# Altium footprint library WR-PHD_Socket Header_2.54mm.PcbLib: 187 footprints (part 5 of 12)
Each footprint in its own frame and in the unit in brackets; x right, y up, seen from the top. Pads: shape width x height; smd on the part's side, far side on the other; paste and mask are expansions set on the pad; w line width, h text height; cw(c..) or ccw(c..) is an arc to the next point about the centre after c.
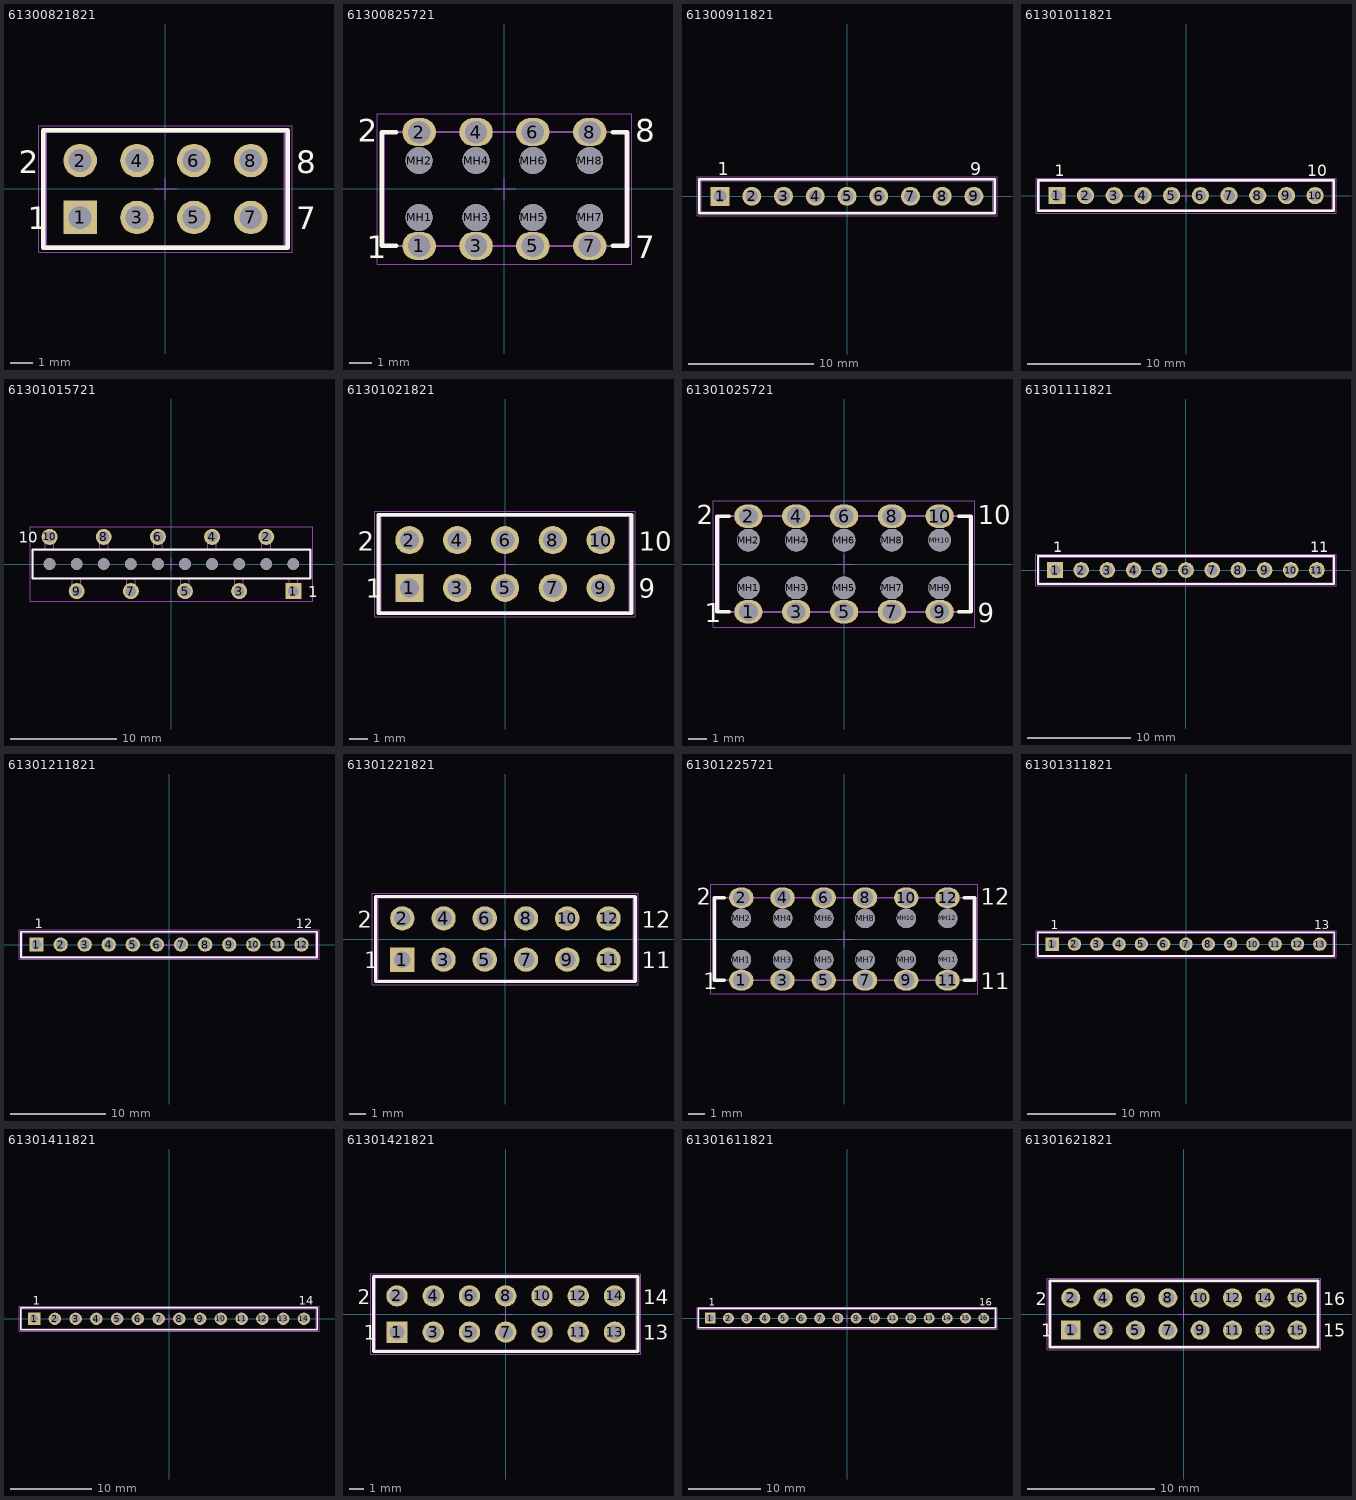
[diagram p4: the footprints below, top view; thin cyan lines are the x and y axes]

## 61300821821 [mm] "Socket Header, Pitch 2.54 mm, THT, Vertical, dual row, 8p"
height 8.4
pads (8):
  rect 1.5x1.5 hole 1.02: 1(-3.81,-1.27)
  round 1.5 hole 1.02: 2(-3.81,1.27) 3(-1.27,-1.27) 4(-1.27,1.27) 5(1.27,-1.27) 6(1.27,1.27) 7(3.81,-1.27) 8(3.81,1.27)
Top Overlay:
  lines w0.2: -5.455,-2.615 -5.455,2.615 5.455,2.615 5.455,-2.615 -5.455,-2.615
  text "2" at -6.54,0.7 h1.02
  text "1" at -6.14,-1.8 h1.02
  text "8" at 5.84,0.7 h1.02
  text "7" at 5.84,-1.8 h1.02
Mechanical 13:
  lines w0.1: -5.33,-2.54 5.33,-2.54 5.33,2.54 -5.33,2.54 -5.33,-2.54
Mechanical 15:
  lines w0.05: -0.5,0 0.5,0 ; 0,-0.5 0,0.5 ; -5.655,-2.815 5.655,-2.815 5.655,2.815 -5.655,2.815 -5.655,-2.815
3D body "61300821821.stp": height 8.45, standoff -3.05, extent -5.33,-2.54 5.33,2.54

## 61300825721 [mm] "Dual Socket Header Bottom Entry, pitch 2.54mm, 8p"
height 5
pads (16):
  oval 1.5x1.25 hole 1: 1(-3.81,-2.54) 2(-3.81,2.54) 3(-1.27,-2.54) 4(-1.27,2.54) 5(1.27,-2.54) 6(1.27,2.54) 7(3.81,-2.54) 8(3.81,2.54)
  round 1.2 hole 1.2 unplated: MH1(-3.81,-1.27) MH2(-3.81,1.27) MH3(-1.27,-1.27) MH4(-1.27,1.27) MH5(1.27,-1.27) MH6(1.27,1.27) MH7(3.81,-1.27) MH8(3.81,1.27)
Top Overlay:
  lines w0.2: -4.84,-2.54 -5.48,-2.54 -5.48,2.54 -4.84,2.54 ; 4.84,-2.54 5.48,-2.54 5.48,2.54 4.84,2.54
  text "8" at 5.84,2.1 h1.02
  text "7" at 5.84,-3.1 h1.02
  text "1" at -6.14,-3.1 h1.02
  text "2" at -6.54,2.1 h1.02
Mechanical 13:
  lines w0.1: -5.38,-2.54 -5.38,2.54 5.38,2.54 5.38,-2.54 -5.38,-2.54
Mechanical 15:
  lines w0.05: -0.5,0 0.5,0 ; 0,-0.5 0,0.5 ; -5.68,-3.365 5.68,-3.365 5.68,3.365 -5.68,3.365 -5.68,-3.365
3D body "61300825721.stp": height 5.05, standoff -3.05, extent -5.38,-2.665 5.38,2.665

## 61300911821 [mm] "Socket Header, Pitch 2.54 mm, THT, Vertical, single row, 9p"
height 8.5
pads (9):
  rect 1.52x1.52 hole 1.02: 1(-10.16,0)
  round 1.52 hole 1.02: 2(-7.62,0) 3(-5.08,0) 4(-2.54,0) 5(0,0) 6(2.54,0) 7(5.08,0) 8(7.62,0) 9(10.16,0)
Top Overlay:
  lines w0.2: -11.805,-1.35 11.805,-1.35 11.805,1.35 -11.805,1.35 -11.805,-1.35
  text "9" at 9.85,1.7 h1.02
  text "1" at -10.35,1.7 h1.02
Mechanical 13:
  lines w0.1: -11.68,-1.25 11.68,-1.25 11.68,1.25 -11.68,1.25 -11.68,-1.25
Mechanical 15:
  lines w0.05: -0.5,0 0.5,0 ; 0,-0.5 0,0.5 ; -12.005,-1.55 12.005,-1.55 12.005,1.55 -12.005,1.55 -12.005,-1.55
3D body "61300911821.stp": height 8.55, standoff -3.06, extent -11.68,-1.25 11.68,1.25

## 61301011821 [mm] "Socket Header, Pitch 2.54 mm, THT, Vertical, single row, 10p"
height 8.5
pads (10):
  rect 1.52x1.52 hole 1.02: 1(-11.43,0)
  round 1.52 hole 1.02: 2(-8.89,0) 3(-6.35,0) 4(-3.81,0) 5(-1.27,0) 6(1.27,0) 7(3.81,0) 8(6.35,0) 9(8.89,0) 10(11.43,0)
Top Overlay:
  lines w0.2: -13.075,-1.35 13.075,-1.35 13.075,1.35 -13.075,1.35 -13.075,-1.35
  text "10" at 10.75,1.7 h1.02
  text "1" at -11.62,1.7 h1.02
Mechanical 13:
  lines w0.1: -12.95,-1.25 12.95,-1.25 12.95,1.25 -12.95,1.25 -12.95,-1.25
Mechanical 15:
  lines w0.05: -0.5,0 0.5,0 ; 0,-0.5 0,0.5 ; -13.275,-1.55 13.275,-1.55 13.275,1.55 -13.275,1.55 -13.275,-1.55
3D body "61301011821.stp": height 8.55, standoff -3.06, extent -12.95,-1.25 12.95,1.25

## 61301015721 [mm] "Socket Header, Pitch 2.54 mm, THT, Vertical, single row, 10p"
height 5
pads (20):
  rect 1.5x1.5 hole 1: 1(11.43,-2.54)
  round 1.5 hole 1: 2(8.89,2.54) 3(6.35,-2.54) 4(3.81,2.54) 5(1.27,-2.54) 6(-1.27,2.54) 7(-3.81,-2.54) 8(-6.35,2.54) 9(-8.89,-2.54) 10(-11.43,2.54)
  round 1.1 hole 1.1 unplated: MH1(11.43,0) MH2(8.89,0) MH3(6.35,0) MH4(3.81,0) MH5(1.27,0) MH6(-1.27,0) MH7(-3.81,0) MH8(-6.35,0) MH9(-8.89,0) MH10(-11.43,0)
Top Overlay:
  lines w0.2: -13.05,-1.345 13.05,-1.345 13.05,1.345 -13.05,1.345 -13.05,-1.345
  text "1" at 12.82,-3.1 h1.02
  text "10" at -14.3,2 h1.02
Mechanical 13:
  lines w0.1: -11.83,1.27 -11.83,2.665 -11.03,2.665 -11.03,1.27 ; -9.29,-1.27 -9.29,-2.665 -8.49,-2.665 -8.49,-1.27 ; -6.75,1.27 -6.75,2.665 -5.95,2.665 -5.95,1.27 ; -4.21,-1.27 -4.21,-2.665 -3.41,-2.665 -3.41,-1.27 ; -1.67,1.27 -1.67,2.665 -0.87,2.665 -0.87,1.27 ; 0.87,-1.27 0.87,-2.665 1.67,-2.665 1.67,-1.27 ; 3.41,1.27 3.41,2.665 4.21,2.665 4.21,1.27 ; 5.95,-1.27 5.95,-2.665 6.75,-2.665 6.75,-1.27 ; 8.49,1.27 8.49,2.665 9.29,2.665 9.29,1.27 ; 11.03,-1.27 11.03,-2.665 11.83,-2.665 11.83,-1.27 ; -12.95,-1.27 12.95,-1.27 12.95,1.27 -12.95,1.27 -12.95,-1.27
Mechanical 15:
  lines w0.05: -0.5,0 0.5,0 ; 0,-0.5 0,0.5 ; -13.25,-3.49 -13.25,3.49 13.25,3.49 13.25,-3.49 -13.25,-3.49
3D body "61301015721.stp": height 5.17, standoff -2.93, extent -13,-2.665 13,2.665

## 61301021821 [mm] "Socket Header, Pitch 2.54 mm, THT, Vertical, dual row, 10p"
height 8.4
pads (10):
  rect 1.5x1.5 hole 1.02: 1(-5.08,-1.27)
  round 1.5 hole 1.02: 2(-5.08,1.27) 3(-2.54,-1.27) 4(-2.54,1.27) 5(0,-1.27) 6(0,1.27) 7(2.54,-1.27) 8(2.54,1.27) 9(5.08,-1.27) 10(5.08,1.27)
Top Overlay:
  lines w0.2: -6.725,-2.615 6.725,-2.615 6.725,2.615 -6.725,2.615 -6.725,-2.615
  text "1" at -7.41,-1.8 h1.02
  text "2" at -7.81,0.7 h1.02
  text "10" at 7.11,0.7 h1.02
  text "9" at 7.11,-1.8 h1.02
Mechanical 13:
  lines w0.1: -6.6,-2.54 -6.6,2.54 6.6,2.54 6.6,-2.54 -6.6,-2.54
Mechanical 15:
  lines w0.05: -0.5,0 0.5,0 ; 0,-0.5 0,0.5 ; -6.925,-2.815 -6.925,2.815 6.925,2.815 6.925,-2.815 -6.925,-2.815
3D body "61301021821.stp": height 8.45, standoff -3.05, extent -6.6,-2.54 6.6,2.54

## 61301025721 [mm] "Dual Socket Header Bottom Entry, pitch 2.54mm, 10p"
height 5
pads (20):
  oval 1.5x1.25 hole 1: 1(-5.08,-2.54) 2(-5.08,2.54) 3(-2.54,-2.54) 4(-2.54,2.54) 5(0,-2.54) 6(0,2.54) 7(2.54,-2.54) 8(2.54,2.54) 9(5.08,-2.54) 10(5.08,2.54)
  round 1.2 hole 1.2 unplated: MH1(-5.08,-1.27) MH2(-5.08,1.27) MH3(-2.54,-1.27) MH4(-2.54,1.27) MH5(0,-1.27) MH6(0,1.27) MH7(2.54,-1.27) MH8(2.54,1.27) MH9(5.08,-1.27) MH10(5.08,1.27)
Top Overlay:
  lines w0.2: -6.11,-2.54 -6.75,-2.54 -6.75,2.54 -6.11,2.54 ; 6.11,-2.54 6.75,-2.54 6.75,2.54 6.11,2.54
  text "2" at -7.81,2.1 h1.02
  text "1" at -7.41,-3.1 h1.02
  text "9" at 7.11,-3.1 h1.02
  text "10" at 7.11,2.1 h1.02
Mechanical 13:
  lines w0.1: -6.65,-2.54 6.65,-2.54 6.65,2.54 -6.65,2.54 -6.65,-2.54
Mechanical 15:
  lines w0.05: -0.5,0 0.5,0 ; 0,-0.5 0,0.5 ; -6.95,-3.365 -6.95,3.365 6.95,3.365 6.95,-3.365 -6.95,-3.365
3D body "61301025721.stp": height 5.05, standoff -3.05, extent -6.65,-2.665 6.65,2.665

## 61301111821 [mm] "Socket Header, Pitch 2.54 mm, THT, Vertical, single row, 11p"
height 8.5
pads (11):
  rect 1.52x1.52 hole 1.02: 1(-12.7,0)
  round 1.52 hole 1.02: 2(-10.16,0) 3(-7.62,0) 4(-5.08,0) 5(-2.54,0) 6(0,0) 7(2.54,0) 8(5.08,0) 9(7.62,0) 10(10.16,0) 11(12.7,0)
Top Overlay:
  lines w0.2: -14.345,-1.35 14.345,-1.35 14.345,1.35 -14.345,1.35 -14.345,-1.35
  text "1" at -12.89,1.7 h1.02
  text "11" at 12.07,1.7 h1.02
Mechanical 13:
  lines w0.1: -14.22,-1.25 14.22,-1.25 14.22,1.25 -14.22,1.25 -14.22,-1.25
Mechanical 15:
  lines w0.05: -0.5,0 0.5,0 ; 0,-0.5 0,0.5 ; -14.545,-1.55 14.545,-1.55 14.545,1.55 -14.545,1.55 -14.545,-1.55
3D body "61301111821 (rev1).stp": height 8.55, standoff -3.05, extent -14.22,-1.25 14.22,1.25

## 61301211821 [mm] "Socket Header, Pitch 2.54 mm, THT, Vertical, single row, 12p"
height 8.5
pads (12):
  rect 1.52x1.52 hole 1.02: 1(-13.97,0)
  round 1.52 hole 1.02: 2(-11.43,0) 3(-8.89,0) 4(-6.35,0) 5(-3.81,0) 6(-1.27,0) 7(1.27,0) 8(3.81,0) 9(6.35,0) 10(8.89,0) 11(11.43,0) 12(13.97,0)
Top Overlay:
  lines w0.2: -15.615,-1.35 -15.615,1.35 15.615,1.35 15.615,-1.35 -15.615,-1.35
  text "1" at -14.16,1.7 h1.02
  text "12" at 13.34,1.7 h1.02
Mechanical 13:
  lines w0.1: -15.49,-1.25 -15.49,1.25 15.49,1.25 15.49,-1.25 -15.49,-1.25
Mechanical 15:
  lines w0.05: -0.5,0 0.5,0 ; 0,-0.5 0,0.5 ; -15.815,-1.55 -15.815,1.55 15.815,1.55 15.815,-1.55 -15.815,-1.55
3D body "61301211821.stp": height 8.55, standoff -3.06, extent -15.49,-1.25 15.49,1.25

## 61301221821 [mm] "Socket Header, Pitch 2.54 mm, THT, Vertical, dual row, 12p"
height 8.4
pads (12):
  rect 1.5x1.5 hole 1.02: 1(-6.35,-1.27)
  round 1.5 hole 1.02: 2(-6.35,1.27) 3(-3.81,-1.27) 4(-3.81,1.27) 5(-1.27,-1.27) 6(-1.27,1.27) 7(1.27,-1.27) 8(1.27,1.27) 9(3.81,-1.27) 10(3.81,1.27) 11(6.35,-1.27) 12(6.35,1.27)
Top Overlay:
  lines w0.2: -7.995,-2.615 -7.995,2.615 7.995,2.615 7.995,-2.615 -7.995,-2.615
  text "2" at -9.08,0.7 h1.02
  text "1" at -8.68,-1.8 h1.02
  text "12" at 8.38,0.7 h1.02
  text "11" at 8.38,-1.8 h1.02
Mechanical 13:
  lines w0.1: -7.87,-2.54 7.87,-2.54 7.87,2.54 -7.87,2.54 -7.87,-2.54
Mechanical 15:
  lines w0.05: -0.5,0 0.5,0 ; 0,-0.5 0,0.5 ; -8.195,-2.815 8.195,-2.815 8.195,2.815 -8.195,2.815 -8.195,-2.815
3D body "61301221821.stp": height 8.45, standoff -3.05, extent -7.87,-2.54 7.87,2.54

## 61301225721 [mm] "Dual Socket Header Bottom Entry, pitch 2.54mm, 12p"
height 5
pads (24):
  oval 1.5x1.25 hole 1: 1(-6.35,-2.54) 2(-6.35,2.54) 3(-3.81,-2.54) 4(-3.81,2.54) 5(-1.27,-2.54) 6(-1.27,2.54) 7(1.27,-2.54) 8(1.27,2.54) 9(3.81,-2.54) 10(3.81,2.54) 11(6.35,-2.54) 12(6.35,2.54)
  round 1.2 hole 1.2 unplated: MH1(-6.35,-1.27) MH2(-6.35,1.27) MH3(-3.81,-1.27) MH4(-3.81,1.27) MH5(-1.27,-1.27) MH6(-1.27,1.27) MH7(1.27,-1.27) MH8(1.27,1.27) MH9(3.81,-1.27) MH10(3.81,1.27) MH11(6.35,-1.27) MH12(6.35,1.27)
Top Overlay:
  lines w0.2: -7.38,-2.54 -8.02,-2.54 -8.02,2.54 -7.38,2.54 ; 7.38,-2.54 8.02,-2.54 8.02,2.54 7.38,2.54
  text "1" at -8.68,-3.1 h1.02
  text "2" at -9.08,2.1 h1.02
  text "11" at 8.38,-3.1 h1.02
  text "12" at 8.38,2.1 h1.02
Mechanical 13:
  lines w0.1: -7.92,-2.54 -7.92,2.54 7.92,2.54 7.92,-2.54 -7.92,-2.54
Mechanical 15:
  lines w0.05: -0.5,0 0.5,0 ; 0,-0.5 0,0.5 ; -8.22,-3.365 8.22,-3.365 8.22,3.365 -8.22,3.365 -8.22,-3.365
3D body "61301225721.stp": height 5.05, standoff -3.05, extent -7.92,-2.665 7.92,2.665

## 61301311821 [mm] "Socket Header, Pitch 2.54 mm, THT, Vertical, single row, 13p"
height 8.5
pads (13):
  rect 1.52x1.52 hole 1.02: 1(-15.24,0)
  round 1.52 hole 1.02: 2(-12.7,0) 3(-10.16,0) 4(-7.62,0) 5(-5.08,0) 6(-2.54,0) 7(0,0) 8(2.54,0) 9(5.08,0) 10(7.62,0) 11(10.16,0) 12(12.7,0) 13(15.24,0)
Top Overlay:
  lines w0.2: -16.885,-1.35 16.885,-1.35 16.885,1.35 -16.885,1.35 -16.885,-1.35
  text "1" at -15.43,1.7 h1.02
  text "13" at 14.61,1.7 h1.02
Mechanical 13:
  lines w0.1: -16.76,-1.25 16.76,-1.25 16.76,1.25 -16.76,1.25 -16.76,-1.25
Mechanical 15:
  lines w0.05: -0.5,0 0.5,0 ; 0,-0.5 0,0.5 ; -17.085,-1.55 17.085,-1.55 17.085,1.55 -17.085,1.55 -17.085,-1.55
3D body "61301311821.stp": height 8.55, standoff -3.06, extent -16.76,-1.25 16.76,1.25

## 61301411821 [mm] "Socket Header, Pitch 2.54 mm, THT, Vertical, single row, 14p"
height 8.5
pads (14):
  rect 1.52x1.52 hole 1.02: 1(-16.51,0)
  round 1.52 hole 1.02: 2(-13.97,0) 3(-11.43,0) 4(-8.89,0) 5(-6.35,0) 6(-3.81,0) 7(-1.27,0) 8(1.27,0) 9(3.81,0) 10(6.35,0) 11(8.89,0) 12(11.43,0) 13(13.97,0) 14(16.51,0)
Top Overlay:
  lines w0.2: -18.155,-1.35 -18.155,1.35 18.155,1.35 18.155,-1.35 -18.155,-1.35
  text "1" at -16.7,1.7 h1.02
  text "14" at 15.88,1.7 h1.02
Mechanical 13:
  lines w0.1: -18.03,-1.25 -18.03,1.25 18.03,1.25 18.03,-1.25 -18.03,-1.25
Mechanical 15:
  lines w0.05: -0.5,0 0.5,0 ; 0,-0.5 0,0.5 ; -18.355,-1.55 -18.355,1.55 18.355,1.55 18.355,-1.55 -18.355,-1.55
3D body "61301411821.stp": height 8.55, standoff -3.06, extent -18.03,-1.25 18.03,1.25

## 61301421821 [mm] "Socket Header, Pitch 2.54 mm, THT, Vertical, dual row, 14p"
height 8.4
pads (14):
  rect 1.5x1.5 hole 1.02: 1(-7.62,-1.27)
  round 1.5 hole 1.02: 2(-7.62,1.27) 3(-5.08,-1.27) 4(-5.08,1.27) 5(-2.54,-1.27) 6(-2.54,1.27) 7(0,-1.27) 8(0,1.27) 9(2.54,-1.27) 10(2.54,1.27) 11(5.08,-1.27) 12(5.08,1.27) 13(7.62,-1.27) 14(7.62,1.27)
Top Overlay:
  lines w0.2: -9.265,-2.615 9.265,-2.615 9.265,2.615 -9.265,2.615 -9.265,-2.615
  text "1" at -9.95,-1.8 h1.02
  text "2" at -10.35,0.7 h1.02
  text "14" at 9.65,0.7 h1.02
  text "13" at 9.65,-1.8 h1.02
Mechanical 13:
  lines w0.1: -9.14,-2.54 -9.14,2.54 9.14,2.54 9.14,-2.54 -9.14,-2.54
Mechanical 15:
  lines w0.05: -0.5,0 0.5,0 ; 0,-0.5 0,0.5 ; -9.465,-2.815 -9.465,2.815 9.465,2.815 9.465,-2.815 -9.465,-2.815
3D body "61301421821.stp": height 8.45, standoff -3.05, extent -9.14,-2.54 9.14,2.54

## 61301611821 [mm] "Socket Header, Pitch 2.54 mm, THT, Vertical, single row, 16p"
height 8.5
pads (16):
  rect 1.52x1.52 hole 1.02: 1(-19.05,0)
  round 1.52 hole 1.02: 2(-16.51,0) 3(-13.97,0) 4(-11.43,0) 5(-8.89,0) 6(-6.35,0) 7(-3.81,0) 8(-1.27,0) 9(1.27,0) 10(3.81,0) 11(6.35,0) 12(8.89,0) 13(11.43,0) 14(13.97,0) 15(16.51,0) 16(19.05,0)
Top Overlay:
  lines w0.2: -20.695,-1.35 -20.695,1.35 20.695,1.35 20.695,-1.35 -20.695,-1.35
  text "1" at -19.24,1.7 h1.02
  text "16" at 18.42,1.7 h1.02
Mechanical 13:
  lines w0.1: -20.57,-1.25 -20.57,1.25 20.57,1.25 20.57,-1.25 -20.57,-1.25
Mechanical 15:
  lines w0.05: -0.5,0 0.5,0 ; 0,-0.5 0,0.5 ; -20.895,-1.55 -20.895,1.55 20.895,1.55 20.895,-1.55 -20.895,-1.55
3D body "61301611821.stp": height 8.55, standoff -3.06, extent -20.57,-1.25 20.57,1.25

## 61301621821 [mm] "Socket Header, Pitch 2.54 mm, THT, Vertical, dual row, 16p"
height 8.4
pads (16):
  rect 1.5x1.5 hole 1.02: 1(-8.89,-1.27)
  round 1.5 hole 1.02: 2(-8.89,1.27) 3(-6.35,-1.27) 4(-6.35,1.27) 5(-3.81,-1.27) 6(-3.81,1.27) 7(-1.27,-1.27) 8(-1.27,1.27) 9(1.27,-1.27) 10(1.27,1.27) 11(3.81,-1.27) 12(3.81,1.27) 13(6.35,-1.27) 14(6.35,1.27) 15(8.89,-1.27) 16(8.89,1.27)
Top Overlay:
  lines w0.2: -10.535,-2.615 -10.535,2.615 10.535,2.615 10.535,-2.615 -10.535,-2.615
  text "2" at -11.62,0.7 h1.02
  text "1" at -11.22,-1.8 h1.02
  text "16" at 10.92,0.7 h1.02
  text "15" at 10.92,-1.8 h1.02
Mechanical 13:
  lines w0.1: -10.41,-2.54 10.41,-2.54 10.41,2.54 -10.41,2.54 -10.41,-2.54
Mechanical 15:
  lines w0.05: -0.5,0 0.5,0 ; 0,-0.5 0,0.5 ; -10.735,-2.815 10.735,-2.815 10.735,2.815 -10.735,2.815 -10.735,-2.815
3D body "61301621821.stp": height 8.45, standoff -3.05, extent -10.41,-2.54 10.41,2.54